# Altium footprint library CAPPM3528X210N.PcbLib: 1 footprints
Each footprint in its own frame and in the unit in brackets; x right, y up, seen from the top. Pads: shape width x height; smd on the part's side, far side on the other; paste and mask are expansions set on the pad; w line width, h text height; cw(c..) or ccw(c..) is an arc to the next point about the centre after c.
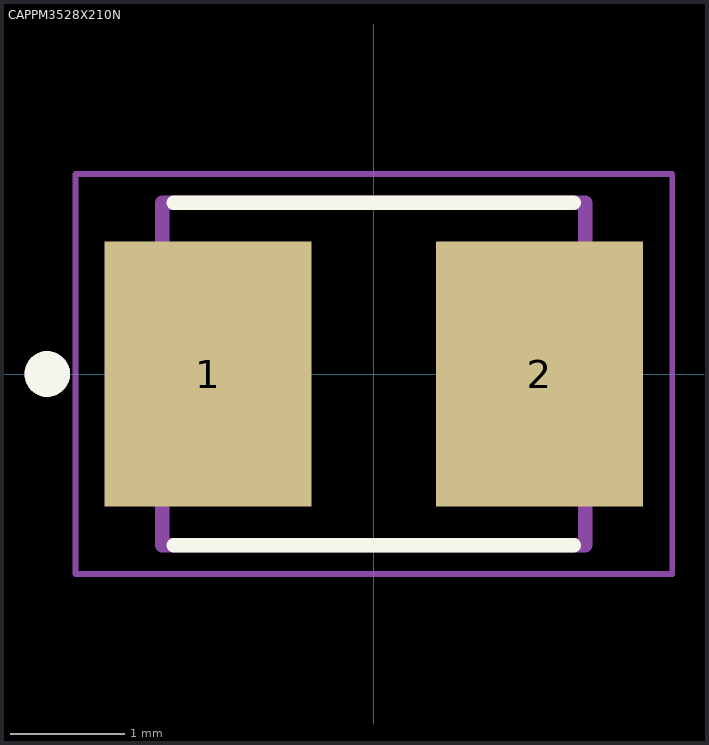
[diagram p0: the footprint, top view; thin cyan lines are the x and y axes]

## CAPPM3528X210N [mm]
pads (2):
  rect 1.81x2.32 smd paste+0 mask+0.102: 1(-1.45,0) 2(1.45,0)
Top Overlay:
  circle w0.2: c-2.857,0 r0.1
  lines w0.127: -1.75,-1.5 1.75,-1.5 ; -1.75,1.5 1.75,1.5
Assembly Top:
  circle w0.2: c-2.857,0 r0.1
  lines w0.127: -1.85,-1.5 1.85,-1.5 1.85,1.5 -1.85,1.5 -1.85,-1.5
Courtyard Top:
  lines w0.05: -2.61,-1.75 -2.61,1.75 2.61,1.75 2.61,-1.75 -2.61,-1.75
3D body "step_temp.STEP": height 2.1, standoff 0, extent -1.75,-1.4 1.75,1.4